# Altium footprint library PCB chave.PcbLib: 1 footprints
Each footprint in its own frame and in the unit in brackets; x right, y up, seen from the top. Pads: shape width x height; smd on the part's side, far side on the other; paste and mask are expansions set on the pad; w line width, h text height; cw(c..) or ccw(c..) is an arc to the next point about the centre after c.
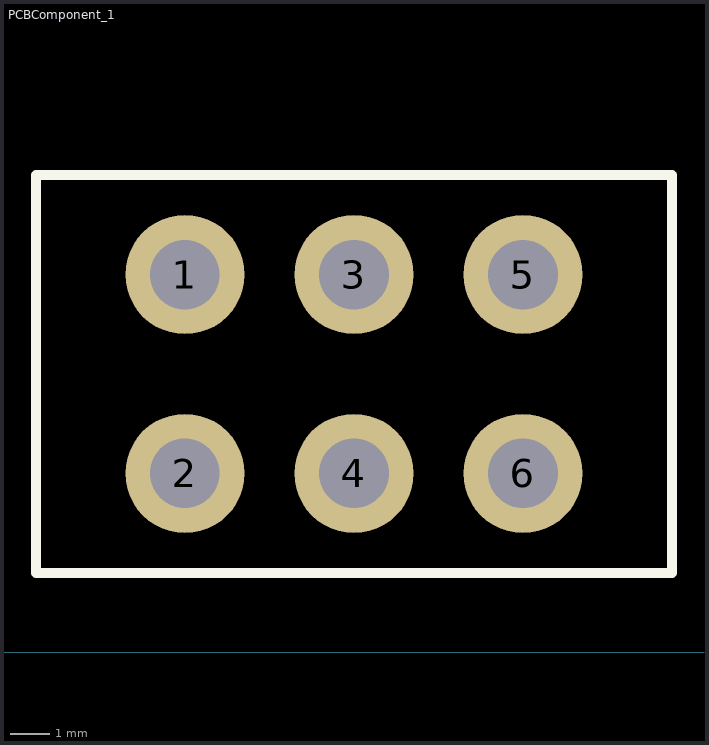
[diagram p0: the footprint, top view; thin cyan lines are the x and y axes]

## PCBComponent_1 [mm]
pads (6):
  round 3 hole 1.75: 1(7.5,9.5) 2(7.5,4.5) 3(11.75,9.5) 4(11.75,4.5) 5(16,9.5) 6(16,4.5)
Top Overlay:
  lines w0.254: 3.75,2 19.752,2 19.752,12 3.75,12 3.75,2